# Altium footprint library custom-case.PcbLib: 483 footprints (part 26 of 31)
Each footprint in its own frame and in the unit in brackets; x right, y up, seen from the top. Pads: shape width x height; smd on the part's side, far side on the other; paste and mask are expansions set on the pad; w line width, h text height; cw(c..) or ccw(c..) is an arc to the next point about the centre after c.
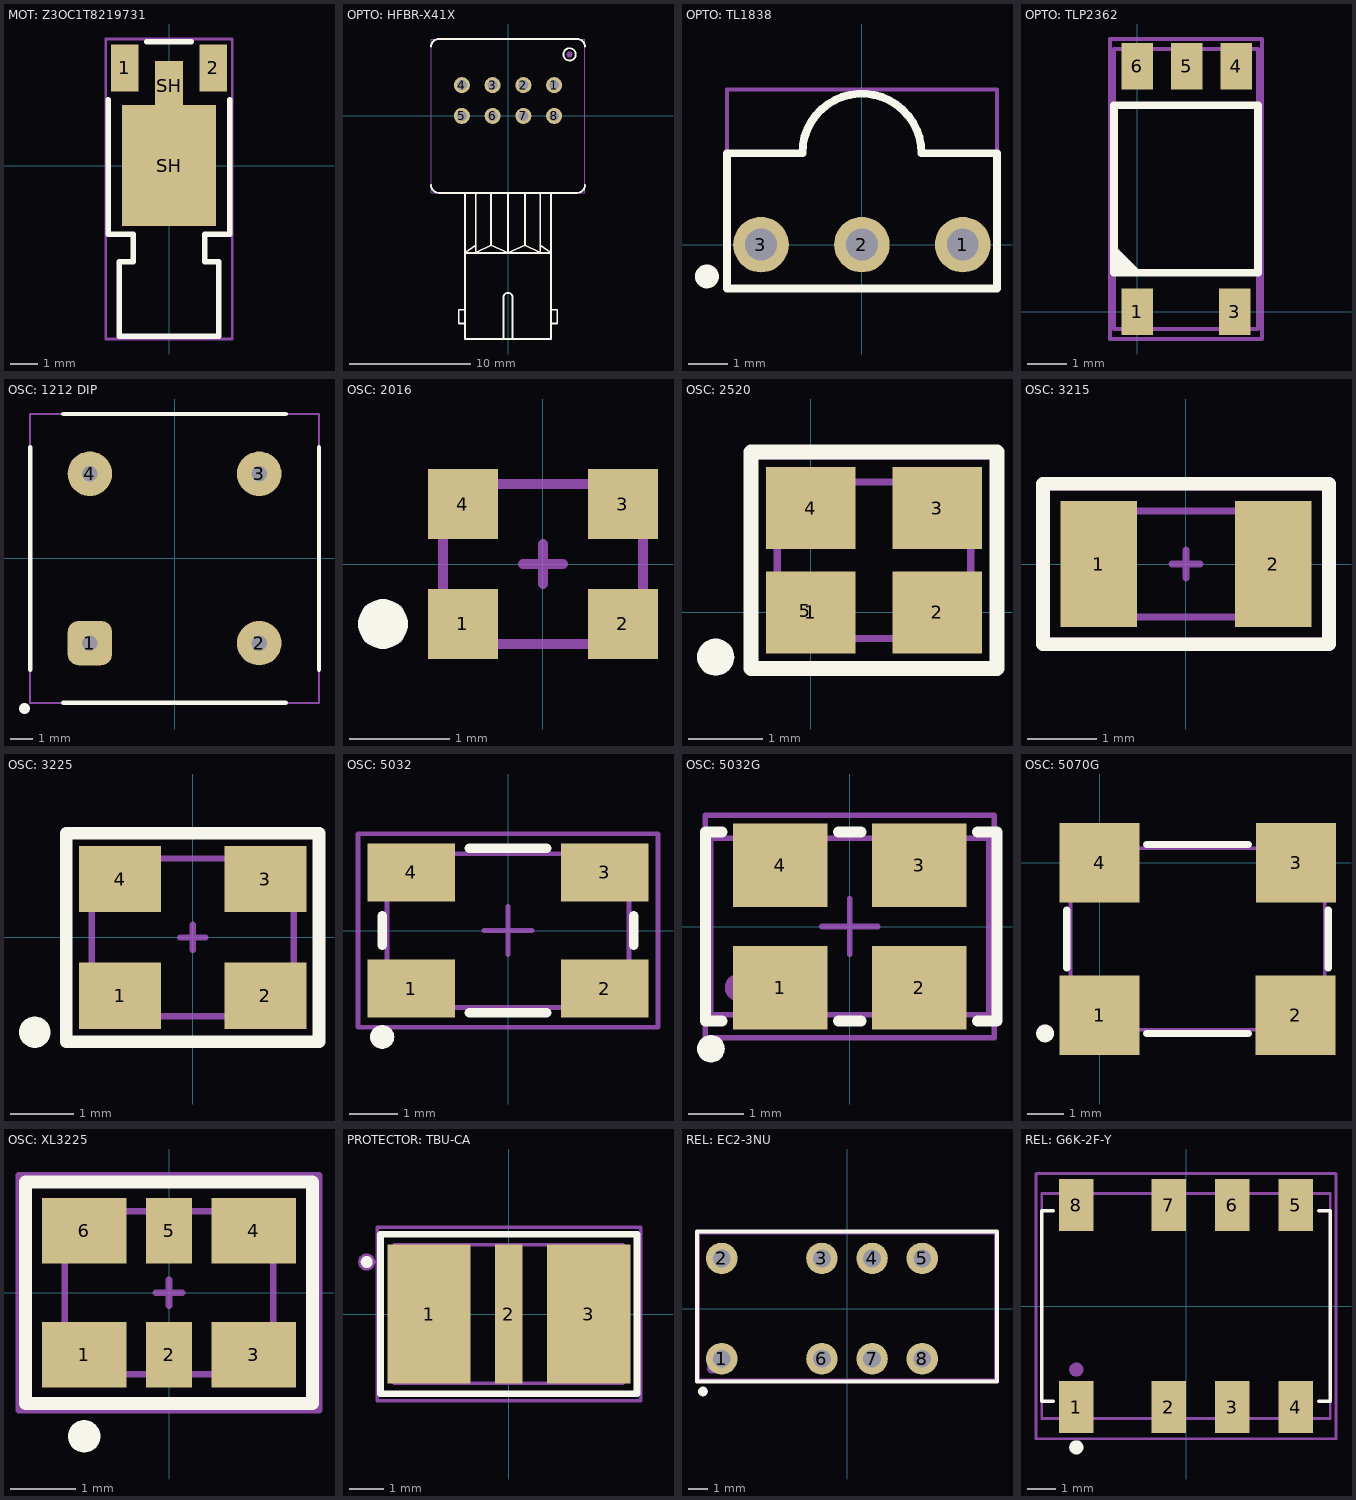
[diagram p25: the footprints below, top view; thin cyan lines are the x and y axes]

## MOT: Z3OC1T8219731 [mm] "SMD vibration motor"
height 9
pads (4):
  rect 1x1.7 smd: 1(-1.6,3.55) 2(1.6,3.55)
  rect 3.4x4.4 smd: SH(0,0)
  rect 1x1.8 smd: SH(0,2.9)
Top Overlay:
  lines w0.2: -2.2,2.4 -2.2,-2.5 -1.3,-2.5 -1.3,-3.1 -1.3,-3.5 -1.8,-3.5 -1.8,-6.2 0,-6.2 1.8,-6.2 1.8,-3.5 1.3,-3.5 1.3,-3.1 1.3,-2.5 2.2,-2.5 2.2,2.4 ; -0.8,4.5 0,4.5 0.8,4.5
Top Assy:
  lines w0.1: -2.3,-6.3 2.3,-6.3 2.3,4.6 -2.3,4.6 -2.3,-6.3
Size Area:
  lines w0.1: -0.5,0 0.5,0 ; 0,-0.5 0,0.5 ; -2.3,-6.3 2.3,-6.3 2.3,4.6 -2.3,4.6 -2.3,-6.3
3D body "Z3OC1T8219731.STEP": height 3.6, standoff 0, extent -2.207,-6.26 2.206,4.403

## OPTO: HFBR-X41X [mil] "Optical fiber receiver/transmitter"
pads (9):
  round 52 hole 32: 1(150,100) 2(50,100) 3(-50,100) 4(-150,100) 5(-150,0) 6(-50,0) 7(50,0) 8(150,0)
  round 19.68 on Mech1: ""(200,200)
Top Overlay:
  circle w6: c200,200 r20
  lines w6: -250,-225 ccw(c-225,-225) -225,-250 -140,-250 ; -250,225 cw(c-225,225) -225,250 225,250 cw(c225,225) 250,225 ; 250,-225 cw(c225,-225) 225,-250 140,-250 ; -140,-675 -140,-725 -15,-725 ; -140,-675 -160,-675 -160,-630 -140,-630 ; -140,-675 -140,-630 ; -140,-630 -140,-445 ; -140,-445 -105,-445 ; -140,-445 -140,-250 ; -140,-445 -105,-420 ; -140,-250 -105,-250 ; -105,-445 -105,-420 ; -105,-445 0,-445 ; -105,-445 -55,-420 ; -105,-420 -105,-250 ; -105,-250 -55,-250 ; -55,-420 0,-445 ; -55,-420 -55,-250 ; -55,-250 0,-250 ; -15,-725 -15,-590 cw(c0,-590) 15,-590 15,-725 ; -15,-725 15,-725 ; 0,-445 0,-250 ; 0,-445 55,-420 ; 0,-445 105,-445 ; 0,-250 55,-250 ; 15,-725 140,-725 140,-675 ; 55,-420 105,-445 ; 55,-420 55,-250 ; 55,-250 105,-250 ; 105,-445 105,-420 ; 105,-445 140,-445 ; 105,-420 140,-445 ; 105,-420 105,-250 ; 105,-250 140,-250 ; 140,-675 160,-675 160,-630 140,-630 ; 140,-675 140,-630 ; 140,-630 140,-445 ; 140,-445 140,-250
Top Assy:
  lines w3.94: -250,-250 250,-250 250,250 -250,250 -250,-250
Size Area:
  lines w3.94: -250,-250 250,-250 250,250 -250,250 -250,-250
3D body "HFBR-x41x.STEP": height 401.57, standoff -141.73, extent -249.91,-820.87 249.93,250

## OPTO: TL1838 [mm] "Infrared Receiver"
pads (4):
  round 1.4 hole 0.8: 1(2.54,0) 2(0,0) 3(-2.54,0)
  round 0.5 on Mech1: ""(-3.9,-0.8)
Top Overlay:
  circle w0.3: c-3.9,-0.8 r0.15
  lines w0.2: -3.4,-1.1 0,-1.1 3.4,-1.1 3.4,2.3 1.5,2.3 ccw(c0,2.3) -1.5,2.3 -3.4,2.3 -3.4,-1.1
Top Assy:
  lines w0.1: -3.4,-1.1 -3.4,3.9 3.4,3.9 3.4,-1.1 -3.4,-1.1
Size Area:
  lines w0.1: -3.4,-1.1 -3.4,3.9 3.4,3.9 3.4,-1.1 -3.4,-1.1
3D body "VS1383B.STEP": height 10.85, standoff -3.85, extent -3.4,-1.1 3.4,3.9

## OPTO: TLP2362 [mm]
pads (6):
  rect 0.8x1.2 smd: 1(0,0) 3(2.5,0) 4(2.54,6.3) 5(1.27,6.3) 6(0,6.3)
  round 0.5 on Mech1: ""(-0.1,0.1)
Top Overlay:
  region: -0.6,1 0.12,1 -0.6,1.72
  lines w0.2: -0.6,1 3.1,1 3.1,5.3 -0.6,5.3 -0.6,1
Top Assy:
  lines w0.1: -0.6,-0.439 3.1,-0.439 3.1,6.739 -0.6,6.739 -0.6,-0.439
Size Area:
  lines w0.1: -0.7,-0.7 3.2,-0.7 3.2,7 -0.7,7 -0.7,-0.7
3D body "TLP2362.STEP": height 2.22, standoff -0.03, extent -0.6,-0.439 3.1,6.739

## OSC: 1212 DIP [mm] "CRYSTAL OSCILLATOR  YSO1212SR DIP"
pads (5):
  rrect50% 2x2 hole 0.7: 1(-3.81,-3.81)
  round 2 hole 0.7: 2(3.81,-3.81) 3(3.81,3.81) 4(-3.81,3.81)
  round 0.5 on Top Overlay: ""(-6.75,-6.75)
Top Overlay:
  lines w0.2: -6.5,-5 -6.5,5 ; -5,-6.5 5,-6.5 ; -5,6.5 5,6.5 ; 6.5,-5 6.5,5
Top Assy:
  lines w0.1: -6.5,-6.5 -6.5,6.5 6.5,6.5 6.5,-6.5 -6.5,-6.5
3D body "YSO1212SR.STEP": height 5.91, standoff -2, extent -6.35,-6.35 6.35,6.35

## OSC: 2016 [mm]
pads (5):
  rect 0.7x0.7 smd: 1(-0.8,-0.6) 2(0.8,-0.6) 3(0.8,0.6) 4(-0.8,0.6)
  round 0.5 on Top Overlay: ""(-1.6,-0.6)
Top Assy:
  circle w0.2: c-1.6,-0.6 r0.1
  lines w0.1: -1,-0.8 -1,0.8 1,0.8 1,-0.8 -1,-0.8
Size Area:
  lines w0.1: -0.2,0 0.2,0 ; 0,-0.2 0,0.2 ; -1,-0.8 -1,0.8 1,0.8 1,-0.8 -1,-0.8
3D body "User Library-XRCGB27M000F2P00R0.STEP": height 0.65, standoff 0, extent -1,-0.8 1,0.8

## OSC: 2520 [mm]
pads (6):
  rect 1.2x1.1 smd: 1(0,0) 2(1.7,0) 3(1.7,1.4) 4(0,1.4)
  round 0.5 on Mech1: 5(-0.075,0.025)
  round 0.5 on Top Overlay: ""(-1.275,-0.6)
Top Overlay:
  lines w0.2: -0.8,-0.75 2.5,-0.75 2.5,2.15 -0.8,2.15 -0.8,-0.75
Top Assy:
  lines w0.1: -0.45,-0.35 -0.45,1.75 2.15,1.75 2.15,-0.35 -0.45,-0.35
Size Area:
  lines w0.1: -0.8,-0.7 -0.8,2.1 2.5,2.1 2.5,-0.7 -0.8,-0.7
3D body "User Library-Crystal NDK NX2520SA series.STEP": height 0.55, standoff 0, extent -0.45,-0.35 2.15,1.75

## OSC: 3215 [mm]
pads (2):
  rect 1.1x1.8 smd: 1(-1.25,0) 2(1.25,0)
Top Overlay:
  lines w0.2: -2.05,-1.15 2.05,-1.15 2.05,1.15 -2.05,1.15 -2.05,-1.15
Top Assy:
  lines w0.1: -1.61,-0.76 -1.61,0.76 1.61,0.76 1.61,-0.76 -1.61,-0.76
Size Area:
  lines w0.1: -0.2,0 0.2,0 ; 0,-0.2 0,0.2 ; -2.05,-1.1 2.05,-1.1 2.05,1.1 -2.05,1.1 -2.05,-1.1
3D body "User Library-ABS07.STEP": height 0.91, standoff 0, extent -1.61,-0.76 1.61,0.76

## OSC: 3225 [mm]
height 0.55
pads (5):
  rect 1.3x1.05 smd: 1(-1.15,-0.925) 2(1.15,-0.925) 3(1.15,0.925) 4(-1.15,0.925)
  round 0.5 on Top Overlay: ""(-2.5,-1.5)
Top Overlay:
  lines w0.2: -2,-1.65 2,-1.65 2,1.65 -2,1.65 -2,-1.65
Top Assy:
  circle w0.2: c-2.5,-1.5 r0.1
  lines w0.1: -1.6,-1.25 -1.6,1.25 1.6,1.25 1.6,-1.25 -1.6,-1.25
Size Area:
  lines w0.1: -0.2,0 0.2,0 ; 0,-0.2 0,0.2 ; -2,-1.7 -2,1.7 2,1.7 2,1.6 2,-1.7 -2,-1.7
3D body "User Library-User Library-Siward_SX3225.step": height 0.81, standoff 0, extent -1.6,-1.25 1.6,1.25

## OSC: 5032 [mm]
pads (6):
  rect 1.8x1.2 smd: 1(-2,-1.2) 2(2,-1.2) 3(2,1.2) 4(-2,1.2)
  round 0.5 on Top Overlay: ""(-2.6,-2.2)
  round 0.5 on Mech1: ""(-2,-1.1)
Top Overlay:
  lines w0.2: -2.6,-0.3 -2.6,0.3 ; -0.8,-1.7 0.8,-1.7 ; -0.8,1.7 0.8,1.7 ; 2.6,-0.3 2.6,0.3
Top Assy:
  lines w0.1: -2.5,-1.587 2.5,-1.587 2.5,1.587 -2.5,1.587 -2.5,-1.587
Size Area:
  lines w0.1: -0.5,0 0.5,0 ; 0,-0.5 0,0.5 ; -3.1,-2 3.1,-2 3.1,2 -3.1,2 -3.1,-2
3D body "ABM3B.STEP": height 1.1, standoff -0.01, extent -2.5,-1.587 2.5,1.587

## OSC: 5032G [mm]
pads (6):
  rect 1.7x1.5 smd: 1(-1.25,-1.1) 2(1.25,-1.1) 3(1.25,1.1) 4(-1.25,1.1)
  round 0.5 on Top Overlay: ""(-2.5,-2.2)
  round 0.5 on Mech1: ""(-2,-1.1)
Top Overlay:
  lines w0.2: -2.3,-1.7 -2.6,-1.7 -2.6,1.7 -2.3,1.7 ; -0.2,-1.7 0.2,-1.7 ; -0.2,1.7 0.2,1.7 ; 2.3,-1.7 2.65,-1.7 2.65,1.7 2.3,1.7
Top Assy:
  lines w0.1: -2.5,-1.587 2.5,-1.587 2.5,1.587 -2.5,1.587 -2.5,-1.587
Size Area:
  lines w0.1: -0.5,0 0.5,0 ; 0,-0.5 0,0.5 ; -2.6,-2 2.6,-2 2.6,2 -2.6,2 -2.6,-2
3D body "User Library-ASFL1.STEP": height 1.38, standoff 0.06, extent -2.473,-1.6 2.527,1.6

## OSC: 5070G [mm]
pads (5):
  rect 2.2x2.2 smd: 1(0,-4.2) 2(5.4,-4.2) 3(5.41,0) 4(0,0)
  round 0.5 on Top Overlay: ""(-1.5,-4.7)
Top Overlay:
  lines w0.2: -0.9,-2.9 -0.9,-1.3 ; 1.3,-4.7 4.1,-4.7 ; 1.3,0.5 4.1,0.5 ; 6.3,-2.9 6.3,-1.3
Top Assy:
  circle w0.2: c-1.5,-4.7 r0.1
  lines w0.1: -0.8,-4.6 -0.8,0.4 6.2,0.4 6.2,-4.6 -0.8,-4.6
3D body "User Library-50 MHz.STEP": height 1.51, standoff -0.01, extent -0.8,-4.6 6.2,0.4

## OSC: XL3225 [mm] "Renesas differential output oscilator"
height 0.55
pads (7):
  rect 1.3x1 smd: 1(-1.3,-0.95) 3(1.3,-0.95) 4(1.3,0.95) 6(-1.3,0.95)
  rect 0.7x1 smd: 2(0,-0.95) 5(0,0.95)
  round 0.5 on Top Overlay: ""(-1.3,-2.2)
Top Overlay:
  lines w0.2: -2.2,-1.7 2.2,-1.7 2.2,1.7 -2.2,1.7 -2.2,-1.7
Top Assy:
  circle w0.2: c-1.3,-2.2 r0.1
  lines w0.1: -1.6,-1.25 -1.6,1.25 1.6,1.25 1.6,-1.25 -1.6,-1.25
Size Area:
  lines w0.1: -0.2,0 0.2,0 ; 0,-0.2 0,0.2 ; -2.3,-1.8 -2.3,1.8 2.3,1.8 2.3,1.2 2.3,-1.8 -2.3,-1.8
3D body "RenesasXL3225.STEP": height 0.91, standoff 0.01, extent -1.6,-1.25 1.6,1.25

## PROTECTOR: TBU-CA [mm] "DFN-3"
pads (5):
  rect 2.4x4 smd paste-3 mask+0: 1(-2.3,0) 3(2.3,0)
  rect 0.8x4 smd paste-3 mask+0: 2(0,0)
  round 0.5 on Mech1: ""(-4.1,1.5)
  round 0.35 on Top Overlay: ""(-4.1,1.5)
Top Overlay:
  lines w0.2: -3.7,-2.3 3.7,-2.3 3.7,2.3 -3.7,2.3 -3.7,0.9 -3.7,-2.3
Top Assy:
  lines w0.1: -3.3,-2 3.3,-2 3.3,2 -3.3,2 -3.3,-2
Size Area:
  lines w0.1: -0.2,0 0.2,0 ; 0,-0.2 0,0.2 ; -3.8,-2.5 -3.8,2.5 3.8,2.5 3.8,-2.5 -3.8,-2.5
3D body "TBU-CA065-200-WH.STEP": height 1, standoff 0, extent -3.25,-2 3.25,2

## REL: EC2-3NU [mm]
pads (10):
  round 1.6 hole 0.9: 1(-6.35,-2.54) 2(-6.35,2.54) 3(-1.27,2.54) 4(1.27,2.54) 5(3.81,2.54) 6(-1.27,-2.54) 7(1.27,-2.54) 8(3.81,-2.54)
  round 0.5 on Top Overlay: ""(-7.3,-4.2)
  round 0.5 on Mech1: ""(-6.85,-3.04)
Top Overlay:
  lines w0.2: -7.6,-3.7 -7.6,3.9 7.6,3.9 7.6,-3.7 -7.6,-3.7
Top Assy:
  lines w0.1: -7.5,-3.59 -7.5,3.81 7.5,3.81 7.5,-3.59 -7.5,-3.59
Size Area:
  lines w0.1: -7.55,-3.64 -7.55,3.86 7.55,3.86 7.55,-3.64 -7.55,-3.64
3D body "User Library-EC2-12.STEP": height 8.2, standoff -3.5, extent -7.5,-3.59 7.5,3.81

## REL: G6K-2F-Y [mm]
pads (10):
  rect 1.2x1.8 smd: 1(-3.8,-3.5) 2(-0.6,-3.5) 3(1.6,-3.5) 4(3.8,-3.5) 5(3.8,3.5) 6(1.6,3.5) 7(-0.6,3.5) 8(-3.8,3.5)
  round 0.5 on Top Overlay: ""(-3.8,-4.9)
  round 0.5 on Mech1: ""(-3.8,-2.2)
Top Overlay:
  lines w0.127: -4.6,-3.3 -5,-3.3 -5,3.3 -4.6,3.3 ; 4.6,-3.3 5,-3.3 5,3.3 4.6,3.3
Top Assy:
  lines w0.1: -5,-3.9 5,-3.9 5,3.9 -5,3.9 -5,-3.9
Size Area:
  lines w0.1: -5.2,-4.6 5.2,-4.6 5.2,4.6 -5.2,4.6 -5.2,-4.6
3D body "step_temp.STEP": height 5.2, standoff 0, extent -5,-3.9 5,3.9